# EAGLE library part X10B25U20T (library pixel)
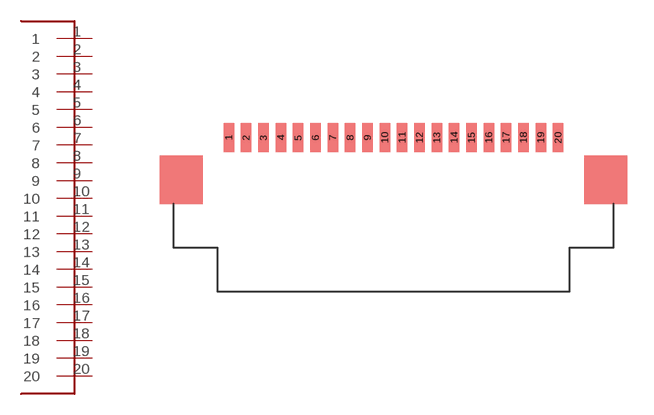
[diagram p14: symbol with the pads of X10B25U20T; footprint X10B25U20T]

Designator prefix -

## X10B25U20T  [X10B25U20T]
1  1
2  2
3  3
4  4
5  5
6  6
7  7
8  8
9  9
10  10
11  11
12  12
13  13
14  14
15  15
16  16
17  17
18  18
19  19
20  20

## Footprint X10B25U20T (pad centres in mm)
smd 0.6 x 1.7: 1 -9.5,-1.016; 2 -8.5,-1.016; 3 -7.5,-1.016; 4 -6.5,-1.016; 5 -5.5,-1.016; 6 -4.5,-1.016; 7 -3.5,-1.016; 8 -2.5,-1.016; 9 -1.5,-1.016; 10 -0.5,-1.016; 11 0.5,-1.016; 12 1.5,-1.016; 13 2.5,-1.016; 14 3.5,-1.016; 15 4.5,-1.016; 16 5.5,-1.016; 17 6.5,-1.016; 18 7.5,-1.016; 19 8.5,-1.016; 20 9.5,-1.016